# Altium integrated library VIETTIEN.IntLib: 167 symbols (part 6 of 8)

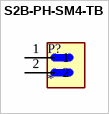
[diagram p115: symbol S2B-PH-SM4-TB]

## S2B-PH-SM4-TB
designator P?
Connector Header Surface Mount, Right Angle 2 position 0.079 (2.00mm); MF: JST Sales; MP: S2B-PH-SM4-TB; SnapEDA_Link: https://www.snapeda.com/parts/S2B-PH-SM4-TB/JST/view-part/?ref=snap; Package: None; Value: *; Check_prices: https://www.snapeda.com/parts/S2B-PH-SM4-TB/JST/view-part/?ref=eda
footprint JST_S2B-PH-SM4-TB
pins: 1, 2


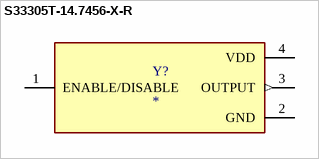
[diagram p116: symbol S33305T-14.7456-X-R]

## S33305T-14.7456-X-R
designator Y?
MP: S33305T-14.7456-X-R; Package: None; Price: None; Value: *; Availability: Unavailable
footprint OSC_S33305T-14.7456-X-R
pins: 1 ENABLE/DISABLE, 2 GND (power), 3 OUTPUT (out), 4 VDD (power)


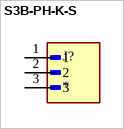
[diagram p117: symbol S3B-PH-K-S]

## S3B-PH-K-S
designator J?
Connector Header Through Hole, Right Angle 3 position 0.079 (2.00mm); MF: JST Sales; MP: S3B-PH-K-S; SnapEDA_Link: https://www.snapeda.com/parts/S3B-PH-K-S/JST/view-part/?ref=snap; Package: NON STANDARD-3 J.S.T.; Value: *; Check_prices: https://www.snapeda.com/parts/S3B-PH-K-S/JST/view-part/?ref=eda
footprint JST_S3B-PH-K-S
pins: 1, 2, 3


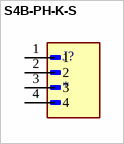
[diagram p118: symbol S4B-PH-K-S]

## S4B-PH-K-S
designator J?
Connector Header Through Hole, Right Angle 4 position 0.079 (2.00mm); MF: JST Sales; MP: S4B-PH-K-S; SnapEDA_Link: https://www.snapeda.com/parts/S4B-PH-K-S/JST/view-part/?ref=snap; Package: NON STANDARD-4 J.S.T.; Value: *; Check_prices: https://www.snapeda.com/parts/S4B-PH-K-S/JST/view-part/?ref=eda
footprint JST_S4B-PH-K-S
pins: 1, 2, 3, 4


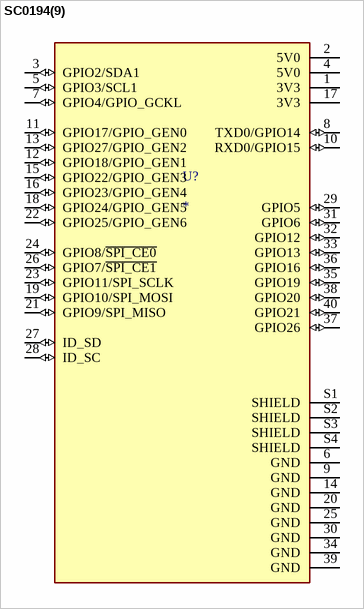
[diagram p119: symbol SC0194(9)]

## SC0194(9)
designator U?
The Raspberry Pi 4 Model B SC0194(9) single board computer features a Broadcom BCM2711 ARM Cortex-A72 quad-core processor operating at 1.5GHz, making it a powerful choice for embedded computing applications. Equipped with 4GB of RAM and a variety of conne; SnapEDA_Link: https://www.snapeda.com/parts/SC0194(9)/Raspberry+Pi/view-part/?ref=snap; Package: None; Value: *; MF: Raspberry Pi; MP: SC0194(9); Check_prices: https://www.snapeda.com/parts/SC0194(9)/Raspberry+Pi/view-part/?ref=eda
footprint MODULE_SC0194(9)
pins: 1 3V3 (power), 2 5V0 (power), 3 GPIO2/SDA1 (io), 4 5V0 (power), 5 GPIO3/SCL1 (io), 6 GND (power), 7 GPIO4/GPIO_GCKL (io), 8 TXD0/GPIO14 (io), 9 GND (power), 10 RXD0/GPIO15 (io), 11 GPIO17/GPIO_GEN0 (io), 12 GPIO18/GPIO_GEN1 (io), 13 GPIO27/GPIO_GEN2 (io), 14 GND (power), 15 GPIO22/GPIO_GEN3 (io), 16 GPIO23/GPIO_GEN4 (io), 17 3V3 (power), 18 GPIO24/GPIO_GEN5 (io), 19 GPIO10/SPI_MOSI (io), 20 GND (power), 21 GPIO9/SPI_MISO (io), 22 GPIO25/GPIO_GEN6 (io), 23 GPIO11/SPI_SCLK (io), 24 GPIO8/~{SPI_CE0} (io), 25 GND (power), 26 GPIO7/~{SPI_CE1} (io), 27 ID_SD (io), 28 ID_SC (io), 29 GPIO5 (io), 30 GND (power), 31 GPIO6 (io), 32 GPIO12 (io), 33 GPIO13 (io), 34 GND (power), 35 GPIO19 (io), 36 GPIO16 (io), 37 GPIO26 (io), 38 GPIO20 (io), 39 GND (power), 40 GPIO21 (io), S1 SHIELD (power), S2 SHIELD (power), S3 SHIELD (power), S4 SHIELD (power)


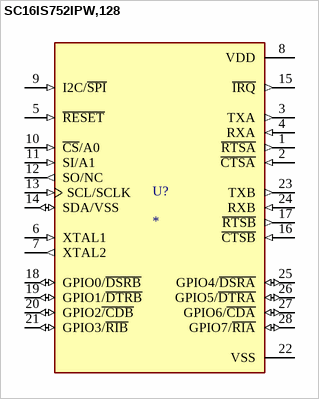
[diagram p120: symbol SC16IS752IPW,128]

## SC16IS752IPW,128
designator U?
RS232, RS485 Controller - IÂ²C, SPI, UART Interface 28-TSSOP; MF: NXP Semiconductors; MP: SC16IS752IPW,128; SnapEDA_Link: https://www.snapeda.com/parts/SC16IS752IPW,128/NXP+Semiconductors/view-part/?ref=snap; Package: TSSOP-28 NXP USA; Value: *; Check_prices: https://www.snapeda.com/parts/SC16IS752IPW,128/NXP+Semiconductors/view-part/?ref=eda
footprint SOP65P640X110-28N
pins: 1 ~{RTSA} (out), 2 ~{CTSA} (in), 3 TXA (out), 4 RXA (in), 5 ~{RESET} (in), 6 XTAL1 (in), 7 XTAL2 (out), 8 VDD (power), 9 I2C/~{SPI} (in), 10 ~{CS}/A0 (in), 11 SI/A1 (in), 12 SO/NC (out), 13 SCL/SCLK (in), 14 SDA/VSS (io), 15 ~{IRQ} (out), 16 ~{CTSB} (in), 17 ~{RTSB} (out), 18 GPIO0/~{DSRB} (io), 19 GPIO1/~{DTRB} (io), 20 GPIO2~{/CDB} (io), 21 GPIO3/~{RIB} (io), 22 VSS (power), 23 TXB (out), 24 RXB (in), 25 GPIO4/~{DSRA} (io), 26 GPIO5/~{DTRA} (io), 27 GPIO6/~{CDA} (io), 28 GPIO7/~{RIA} (io)


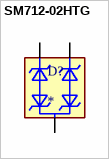
[diagram p121: symbol SM712-02HTG]

## SM712-02HTG
designator D?
TVS Diode, SM712 Series, 31V Clamp, 600W Peak Pulse, Surface Mount, SOT23-3 | Littelfuse SM712-02HTG; MF: Littelfuse Inc.; SnapEDA_Link: https://www.snapeda.com/parts/SM712-02HTG/Littelfuse/view-part/?ref=snap; Package: SOT-23 Littelfuse Inc.; Value: *; MP: SM712-02HTG; Check_prices: https://www.snapeda.com/parts/SM712-02HTG/Littelfuse/view-part/?ref=eda
footprint SOT23
pins: 1, 2, 3


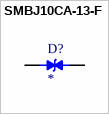
[diagram p122: symbol SMBJ10CA-13-F]

## SMBJ10CA-13-F
designator D?
MF: {'manufacturer': u'Diodes Incorporated'}; MP: SMBJ10CA-13-F; Package: None; Price: None; Value: *; Availability: Unavailable
footprint DIOM4336X265N
pins: 1, 2


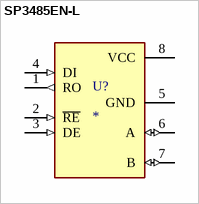
[diagram p123: symbol SP3485EN-L]

## SP3485EN-L
designator U?
1/1 Transceiver Half RS422, RS485 8-SOIC; MF: MaxLinear, Inc.; MP: SP3485EN-L; SnapEDA_Link: https://www.snapeda.com/parts/SP3485EN-L/MaxLinear/view-part/?ref=snap; Package: None; Value: *; Check_prices: https://www.snapeda.com/parts/SP3485EN-L/MaxLinear/view-part/?ref=eda
footprint SOIC127P599X175-8N
pins: 1 RO (out), 2 ~{RE} (in), 3 DE (in), 4 DI (in), 5 GND (power), 6 A (io), 7 B (io), 8 VCC (power)


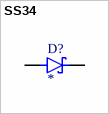
[diagram p124: symbol SS34]

## SS34
designator D?
3A, 40V, Schottky Rectifier; MF: Taiwan Semiconductor; MP: SS34; SnapEDA_Link: https://www.snapeda.com/parts/SS34/taiwan/view-part/?ref=snap; Package: DO-214AB-2 Taiwan Semiconductor; Value: *; Check_prices: https://www.snapeda.com/parts/SS34/taiwan/view-part/?ref=eda
footprint DIO_SS34
pins: A, C K


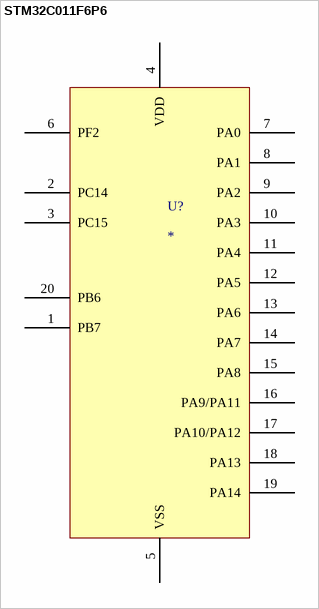
[diagram p125: symbol STM32C011F6P6]

## STM32C011F6P6
designator U?
ARM Microcontrollers - MCU Mainstream Arm Cortex-M0+ MCU 32 Kbytes Flash 6 Kbytes RAM 48 MHz CPU 2x USART / STM32C011F6P6
footprint SOIC65P640X120-20N
pins: 1 PB7, 2 PC14, 3 PC15, 4 VDD, 5 VSS, 6 PF2, 7 PA0, 8 PA1, 9 PA2, 10 PA3, 11 PA4, 12 PA5, 13 PA6, 14 PA7, 15 PA8, 16 PA9/PA11, 17 PA10/PA12, 18 PA13, 19 PA14, 20 PB6


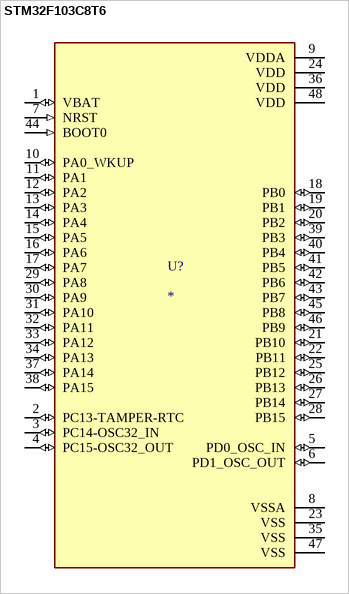
[diagram p126: symbol STM32F103C8T6]

## STM32F103C8T6
designator U?
ARM® Cortex®-M3 STM32F1 Microcontroller IC 32-Bit 72MHz 64KB (64K x 8) FLASH 48-LQFP (7x7); MF: STMicroelectronics; MP: STM32F103C8T6; SnapEDA_Link: https://www.snapeda.com/parts/STM32F103C8T6/STMicroelectronics/view-part/?ref=snap; Package: LQFP-48 STMicroelectronics; Value: *; Check_prices: https://www.snapeda.com/parts/STM32F103C8T6/STMicroelectronics/view-part/?ref=eda
footprint QFP50P900X900X160-48N
pins: 1 VBAT (io), 2 PC13-TAMPER-RTC (io), 3 PC14-OSC32_IN (io), 4 PC15-OSC32_OUT (io), 5 PD0_OSC_IN (io), 6 PD1_OSC_OUT (io), 7 NRST (in), 8 VSSA (power), 9 VDDA (power), 10 PA0_WKUP (io), 11 PA1 (io), 12 PA2 (io), 13 PA3 (io), 14 PA4 (io), 15 PA5 (io), 16 PA6 (io), 17 PA7 (io), 18 PB0 (io), 19 PB1 (io), 20 PB2 (io), 21 PB10 (io), 22 PB11 (io), 23 VSS (power), 24 VDD (power), 25 PB12 (io), 26 PB13 (io), 27 PB14 (io), 28 PB15 (io), 29 PA8 (io), 30 PA9 (io), 31 PA10 (io), 32 PA11 (io), 33 PA12 (io), 34 PA13 (io), 35 VSS (power), 36 VDD (power), 37 PA14 (io), 38 PA15 (io), 39 PB3 (io), 40 PB4 (io), 41 PB5 (io), 42 PB6 (io), 43 PB7 (io), 44 BOOT0 (in), 45 PB8 (io), 46 PB9 (io), 47 VSS (power), 48 VDD (power)


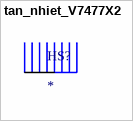
[diagram p127: symbol tan_nhiet_V7477X2]

## tan_nhiet_V7477X2
designator HS?
Extruded heatsink with solderpins - 11K/W - 38,1x35x12,7mm - black anodized - TOP-3, TO-220, SOT-32 retaining spring V03HK; MF: Assmann WSW Components; MP: V7477X2; SnapEDA_Link: https://www.snapeda.com/parts/V7477X2/Assmann+Electronics/view-part/?ref=snap; Package: None; Value: *; Check_prices: https://www.snapeda.com/parts/V7477X2/Assmann+Electronics/view-part/?ref=eda
footprint HSINK_V7477X2
pins: HS1 S, HS2 S


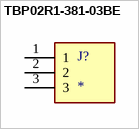
[diagram p128: symbol TBP02R1-381-03BE]

## TBP02R1-381-03BE
designator J?
2~24 Poles, Pluggable,Receptacle, Horizontal, 3.81 Pitch, Terminal Block Connector; MF: Same Sky; MP: TBP02R1-381-03BE; SnapEDA_Link: https://www.snapeda.com/parts/TBP02R1-381-03BE/Same+Sky/view-part/?ref=snap; Package: None; Value: *; Check_prices: https://www.snapeda.com/parts/TBP02R1-381-03BE/Same+Sky/view-part/?ref=eda
footprint CUI_TBP02R1-381-03BE
pins: 1, 2, 3


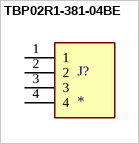
[diagram p129: symbol TBP02R1-381-04BE]

## TBP02R1-381-04BE
designator J?
2~24 Poles, Pluggable,Receptacle, Horizontal, 3.81 Pitch, Terminal Block Connector; MF: Same Sky; MP: TBP02R1-381-04BE; SnapEDA_Link: https://www.snapeda.com/parts/TBP02R1-381-04BE/Same+Sky/view-part/?ref=snap; Package: None; Value: *; Check_prices: https://www.snapeda.com/parts/TBP02R1-381-04BE/Same+Sky/view-part/?ref=eda
footprint CUI_TBP02R1-381-04BE
pins: 1, 2, 3, 4


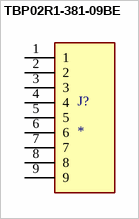
[diagram p130: symbol TBP02R1-381-09BE]

## TBP02R1-381-09BE
designator J?
2~24 Poles, Pluggable,Receptacle, Horizontal, 3.81 Pitch, Terminal Block Connector; MF: Same Sky; MP: TBP02R1-381-09BE; SnapEDA_Link: https://www.snapeda.com/parts/TBP02R1-381-09BE/Same+Sky/view-part/?ref=snap; Package: None; Value: *; Check_prices: https://www.snapeda.com/parts/TBP02R1-381-09BE/Same+Sky/view-part/?ref=eda
footprint CUI_TBP02R1-381-09BE
pins: 1, 2, 3, 4, 5, 6, 7, 8, 9


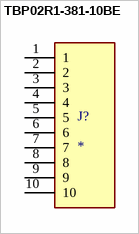
[diagram p131: symbol TBP02R1-381-10BE]

## TBP02R1-381-10BE
designator J?
2â€“24 Ð¿Ð¾Ð»ÑŽÑÐ°, Ð¿Ð¾Ð´ÐºÐ»ÑŽÑ‡Ð°ÐµÐ¼Ñ‹Ðµ, Ñ Ñ€Ð¾Ð·ÐµÑ‚ÐºÐ¾Ð¹, Ð³Ð¾Ñ€Ð¸Ð·Ð¾Ð½Ñ‚Ð°Ð»ÑŒÐ½Ñ‹Ðµ, Ñ ÑˆÐ°Ð³Ð¾Ð¼ 3,81, ÐºÐ»ÐµÐ¼Ð¼Ð½Ð°Ñ ÐºÐ¾Ð»Ð¾Ð´ÐºÐ°; MF: Same Sky; MP: TBP02R1-381-10BE; SnapEDA_Link: https://www.snapeda.com/parts/TBP02R1-381-10BE/Same+Sky/view-part/?ref=snap; Package: None; Value: *; Check_prices: https://www.snapeda.com/parts/TBP02R1-381-10BE/Same+Sky/view-part/?ref=eda
footprint CUI_TBP02R1-381-10BE
pins: 1, 2, 3, 4, 5, 6, 7, 8, 9, 10


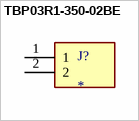
[diagram p132: symbol TBP03R1-350-02BE]

## TBP03R1-350-02BE
designator J?
2~24 Poles, Pluggable, Receptacle, Horizontal, 3.50 Pitch, Terminal Block Connector; MF: Same Sky; MP: TBP03R1-350-02BE; SnapEDA_Link: https://www.snapeda.com/parts/TBP03R1-350-02BE/Same+Sky/view-part/?ref=snap; Package: None; Value: *; Check_prices: https://www.snapeda.com/parts/TBP03R1-350-02BE/Same+Sky/view-part/?ref=eda
footprint CUI_TBP03R1-350-02BE
pins: 1, 2


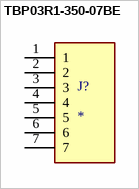
[diagram p133: symbol TBP03R1-350-07BE]

## TBP03R1-350-07BE
designator J?
2~24 Poles, Pluggable, Receptacle, Horizontal, 3.50 Pitch, Terminal Block Connector; MF: Same Sky; MP: TBP03R1-350-07BE; SnapEDA_Link: https://www.snapeda.com/parts/TBP03R1-350-07BE/Same+Sky/view-part/?ref=snap; Package: None; Value: *; Check_prices: https://www.snapeda.com/parts/TBP03R1-350-07BE/Same+Sky/view-part/?ref=eda
footprint CUI_TBP03R1-350-07BE
pins: 1, 2, 3, 4, 5, 6, 7


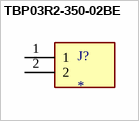
[diagram p134: symbol TBP03R2-350-02BE]

## TBP03R2-350-02BE
designator J?
2~24 Poles, Pluggable, Receptacle, Vertical, 3.50 Pitch, Terminal Block Connector; MF: Same Sky; MP: TBP03R2-350-02BE; SnapEDA_Link: https://www.snapeda.com/parts/TBP03R2-350-02BE/Same+Sky/view-part/?ref=snap; Package: None; Value: *; Check_prices: https://www.snapeda.com/parts/TBP03R2-350-02BE/Same+Sky/view-part/?ref=eda
footprint CUI_TBP03R2-350-02BE
pins: 1, 2


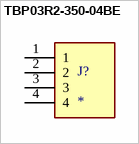
[diagram p135: symbol TBP03R2-350-04BE]

## TBP03R2-350-04BE
designator J?
2~24 Poles, Pluggable, Receptacle, Vertical, 3.50 Pitch, Terminal Block Connector; MF: Same Sky; MP: TBP03R2-350-04BE; SnapEDA_Link: https://www.snapeda.com/parts/TBP03R2-350-04BE/Same+Sky/view-part/?ref=snap; Package: None; Value: *; Check_prices: https://www.snapeda.com/parts/TBP03R2-350-04BE/Same+Sky/view-part/?ref=eda
footprint CUI_TBP03R2-350-04BE
pins: 1, 2, 3, 4


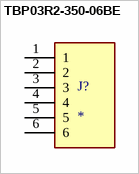
[diagram p136: symbol TBP03R2-350-06BE]

## TBP03R2-350-06BE
designator J?
2~24 Poles, Pluggable, Receptacle, Vertical, 3.50 Pitch, Terminal Block Connector; MF: Same Sky; MP: TBP03R2-350-06BE; SnapEDA_Link: https://www.snapeda.com/parts/TBP03R2-350-06BE/Same+Sky/view-part/?ref=snap; Package: None; Value: *; Check_prices: https://www.snapeda.com/parts/TBP03R2-350-06BE/Same+Sky/view-part/?ref=eda
footprint CUI_TBP03R2-350-06BE
pins: 1, 2, 3, 4, 5, 6


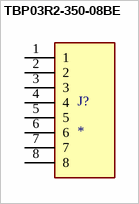
[diagram p137: symbol TBP03R2-350-08BE]

## TBP03R2-350-08BE
designator J?
2~24 Poles, Pluggable, Receptacle, Vertical, 3.50 Pitch, Terminal Block Connector; MF: Same Sky; MP: TBP03R2-350-08BE; SnapEDA_Link: https://www.snapeda.com/parts/TBP03R2-350-08BE/Same+Sky/view-part/?ref=snap; Package: None; Value: *; Check_prices: https://www.snapeda.com/parts/TBP03R2-350-08BE/Same+Sky/view-part/?ref=eda
footprint CUI_TBP03R2-350-08BE
pins: 1, 2, 3, 4, 5, 6, 7, 8
